# Altium schematic symbol library Schlib2.SchLib: 2 symbols
Pins are listed as number, name and electrical type; pins without a type are passive.

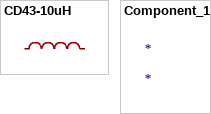
[diagram p0: symbols CD43-10uH to Component_1]

## CD43-10uH
designator U1  (value not drawn)
AddInBom: yes; ModelId: fc5e8c13a5db48cc9753193df7da3342ÂŽ0819f05c4eef4c71ace90d822a990e87; ModelName: IND-SMD_L4.5-W4.0-H3.2; ModelTransform: 157.48,170.221,0,90,0,0,0,-0.591,0; Symbol: CD43-10UH; Device: CD43-10uH; LCSC Part Name: CD43-10uH; SupplierPart: C9900008796; ManufacturerPart: CD43-10uH; Supplier Footprint: IND-SMD_L4.5-W4.0; JLCPCB Part Class: Extended Part; Supplier: LCSC; ConvertToPcb: yes; FootprintName: IND-SMD_L4.5-W4.0
footprint IND-SMD_L4.5-W4.0
pins: 1, 2

## Component_1
designator *